# Altium footprint library USB_B.PcbLib: 1 footprints
Each footprint in its own frame and in the unit in brackets; x right, y up, seen from the top. Pads: shape width x height; smd on the part's side, far side on the other; paste and mask are expansions set on the pad; w line width, h text height; cw(c..) or ccw(c..) is an arc to the next point about the centre after c.
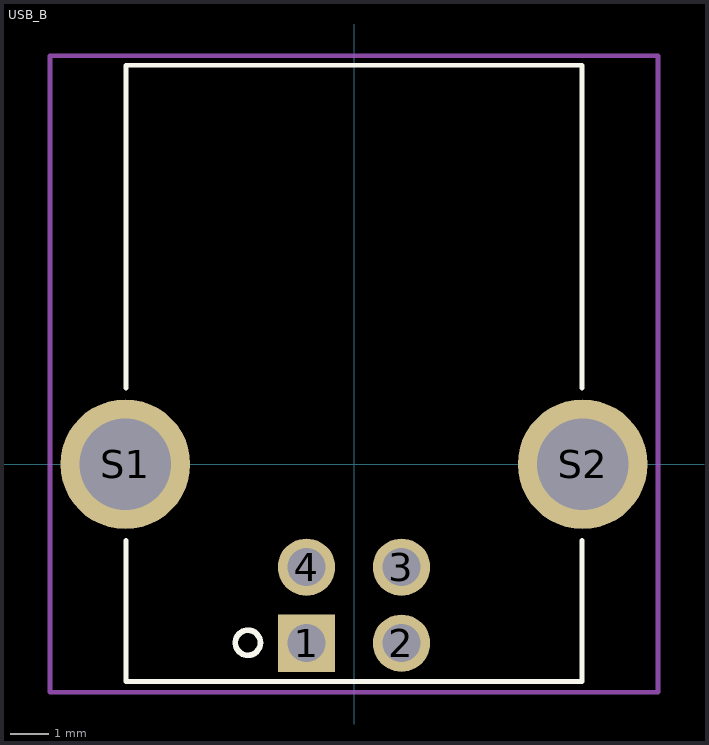
[diagram p0: the footprint, top view; thin cyan lines are the x and y axes]

## USB_B [mm] "USB B F RA"
pads (6):
  rect 1.508x1.508 hole 1: 1(-1.25,-4.71)
  round 1.508 hole 1: 2(1.25,-4.71) 3(1.25,-2.71) 4(-1.25,-2.71)
  round 3.416 hole 2.4: S1(-6.02,0) S2(6.02,0)
Top Overlay:
  circle w0.152: c-2.794,-4.699 r0.33
  lines w0.127: -6,-2 -6,-5.715 6,-5.715 6,-2 ; -6,2 -6,10.5 6,10.5 6,2
Mechanical 15:
  lines w0.127: -8,-6 8,-6 8,10.75 -8,10.75 -8,-6
3D body "USB_B.stp": height 10.87, standoff -4.09, extent -7.422,-5.9 7.422,10.4